# Altium schematic symbol library Centralize.SchLib: 1081 symbols (part 10 of 26)
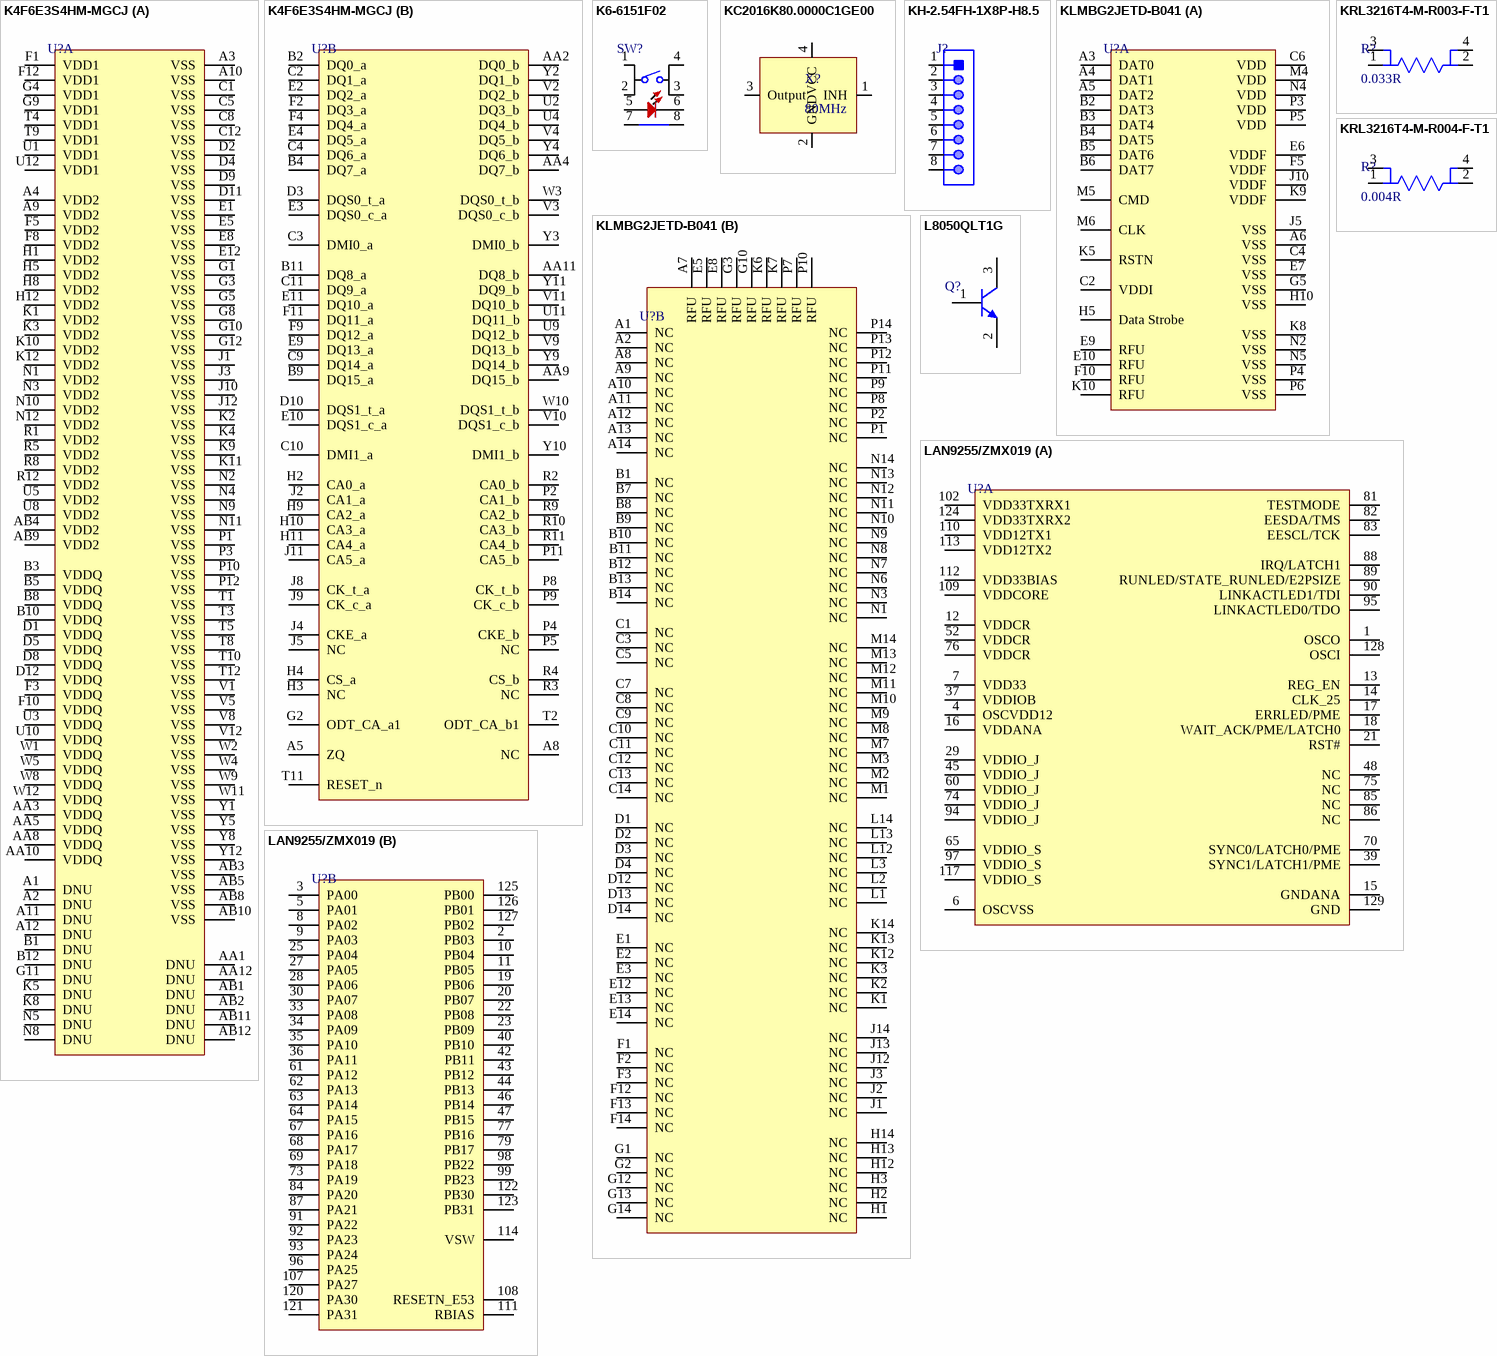
[diagram p56: symbols K4F6E3S4HM-MGCJ to LAN9255/ZMX019]

## KH-2.54FH-1X8P-H8.5
designator J?
2.54mm Plugin 3A -40℃~+105℃ Straight 1x8P 8.5mm Top 8 Square Holes Plugin,P=2.54mm Female Headers ROHS; Manufacturer: Shenzhen Kinghelm Elec; Manufacturer Part Number: KH-2.54FH-1X8P-H8.5; Item Type: Header; Package: Plugin,P=2.54mm; LCSC Part Number: C2905417; ComponentLink1Description: LCSC; ComponentLink1URL: https://www.lcsc.com/product-detail/span-style-background-color-ff0-Female-span-Headers_Shenzhen-Kinghelm-Elec-KH-2-54FH-1X8P-H8-5_C2905417.html
footprint HDR1X8 Female (Connector; Header; 8 Position)
pins: 1, 2, 3, 4, 5, 6, 7, 8

## KLMBG2JETD-B041
designator U?
FBGA-153 eMMC ROHS; Manufacturer: Samsung; Manufacturer Part Number: KLMBG2JETD-B041; Item Type: IC; Package: FBGA-153; LCSC Part Number: C2803245; ComponentLink1Description: LCSC; ComponentLink1URL: https://www.lcsc.com/product-detail/eMMC_Samsung-KLMBG2JETD-B041_C2803245.html
footprint BGA-153_
part A pins: A3 DAT0, A4 DAT1, A5 DAT2, A6 VSS, B2 DAT3, B3 DAT4, B4 DAT5, B5 DAT6, B6 DAT7, C2 VDDI, C4 VSS, C6 VDD, E6 VDDF, E7 VSS, E9 RFU, E10 RFU, F5 VDDF, F10 RFU, G5 VSS, H5 Data Strobe, H10 VSS, J5 VSS, J10 VDDF, K5 RSTN, K8 VSS, K9 VDDF, K10 RFU, M4 VDD, M5 CMD, M6 CLK, N2 VSS, N4 VDD, N5 VSS, P3 VDD, P4 VSS, P5 VDD, P6 VSS
part B pins: A1 NC, A2 NC, A7 RFU, A8 NC, A9 NC, A10 NC, A11 NC, A12 NC, A13 NC, A14 NC, B1 NC, B7 NC, B8 NC, B9 NC, B10 NC, B11 NC, B12 NC, B13 NC, B14 NC, C1 NC, C3 NC, C5 NC, C7 NC, C8 NC, C9 NC, C10 NC, C11 NC, C12 NC, C13 NC, C14 NC, D1 NC, D2 NC, D3 NC, D4 NC, D12 NC, D13 NC, D14 NC, E1 NC, E2 NC, E3 NC, E5 RFU, E8 RFU, E12 NC, E13 NC, E14 NC, F1 NC, F2 NC, F3 NC, F12 NC, F13 NC, F14 NC, G1 NC, G2 NC, G3 RFU, G10 RFU, G12 NC, G13 NC, G14 NC, H1 NC, H2 NC, H3 NC, H12 NC, H13 NC, H14 NC, J1 NC, J2 NC, J3 NC, J12 NC, J13 NC, J14 NC, K1 NC, K2 NC, K3 NC, K6 RFU, K7 RFU, K12 NC, K13 NC, K14 NC, L1 NC, L2 NC, L3 NC, L12 NC, L13 NC, L14 NC, M1 NC, M2 NC, M3 NC, M7 NC, M8 NC, M9 NC, M10 NC, M11 NC, M12 NC, M13 NC, M14 NC, N1 NC, N3 NC, N6 NC, N7 NC, N8 NC, N9 NC, N10 NC, N11 NC, N12 NC, N13 NC, N14 NC, P1 NC, P2 NC, P7 RFU, P8 NC, P9 NC, P10 RFU, P11 NC, P12 NC, P13 NC, P14 NC

## KRL3216T4-M-R003-F-T1
designator R?, comment 0.033R
RES 0.003 OHM 1W 1206 WIDE; Manufacturer: Susumu; Manufacturer Part Number: KRL3216T4-M-R003-F-T1; Resistance: 3mR; Tolerance: 1%; Temperature Coefficient: 100ppm/°C; Item Type: Resistor; Supplier 1: Mouser; RoHS: Yes; Category: Chip SMD Resistors; Stock 1: 654; Pricing 1: 1=1.70000, 10=1.70000, 50=1.70000, 100=0.84700, 1000=0.72000, 10000=0.72000 (USD); Case/Package: 1206; Case Code (Metric): 3216; Case Code (Imperial): 1206; Min Operating Temperature: -55°C; Max Operating Temperature: 155°C; Packaging: Tape and Reel; Resistor Type: Metal Foil; Number of Terminations: 4; Max Power Dissipation: 1W; Features: Automotive AEC-Q200; Length: 0.063inch; Width: 0.126inch; Height: 0.028inch; RoHS Compliant: Yes; ComponentLink1URL: https://datasheet.ciiva.com/29724/e-19-29724443.pdf?src-supplier=Digi-Key; ComponentLink1Description: https://datasheet.ciiva.com/29724/e-19-29724443.pdf?src-supplier=Digi-Key; Supplier Part Number 1: 754-KRL3216T4MR003FT; LCSC Part Number: C4119998
footprint Wide 1206
pins: 1, 2, 3, 4

## KRL3216T4-M-R004-F-T1
designator R?, comment 0.004R
RES 0.004 OHM 1W 1206 WIDE; Manufacturer: Susumu; Manufacturer Part Number: KRL3216T4-M-R004-F-T1; Resistance: 4mR; Tolerance: 1%; Temperature Coefficient: 50ppm/°C; Item Type: Resistor; Supplier 1: Newark; RoHS: Yes; Category: Chip SMD Resistors; Pricing 1: 1000=1.59000 (USD); Case/Package: 1206; Case Code (Metric): 3216; Case Code (Imperial): 1206; Min Operating Temperature: -55°C; Max Operating Temperature: 155°C; Packaging: Tape and Reel; Resistor Type: Metal Foil; Number of Terminations: 4; Max Power Dissipation: 1W; Features: Automotive AEC-Q200; Length: 0.063inch; Width: 0.126inch; Height: 0.028inch; RoHS Compliant: Yes; ComponentLink1URL: https://datasheet.ciiva.com/29724/e-19-29724444.pdf?src-supplier=Digi-Key; ComponentLink1Description: https://datasheet.ciiva.com/29724/e-19-29724444.pdf?src-supplier=Digi-Key; Supplier Part Number 1: 11AC4846; LCSC Part Number: C4031441
footprint Wide 1206
pins: 1, 2, 3, 4

## L8050QLT1G
designator Q?
25V 225mW 800mA NPN SOT-23 Bipolar Transistors - BJT ROHS; Manufacturer: LRC; Manufacturer Part Number: L8050QLT1G; Item Type: Mosfet; Package: SOT-23; LCSC Part Number: C49581; ComponentLink1Description: LCSC; ComponentLink1URL: https://www.lcsc.com/product-detail/Bipolar-Transistors-BJT_LRC-L8050QLT1G_C49581.html
footprint SOT-23 (TRANS NPN 40V 0.6A SOT23)
pins: 1 B, 2 E, 3 C

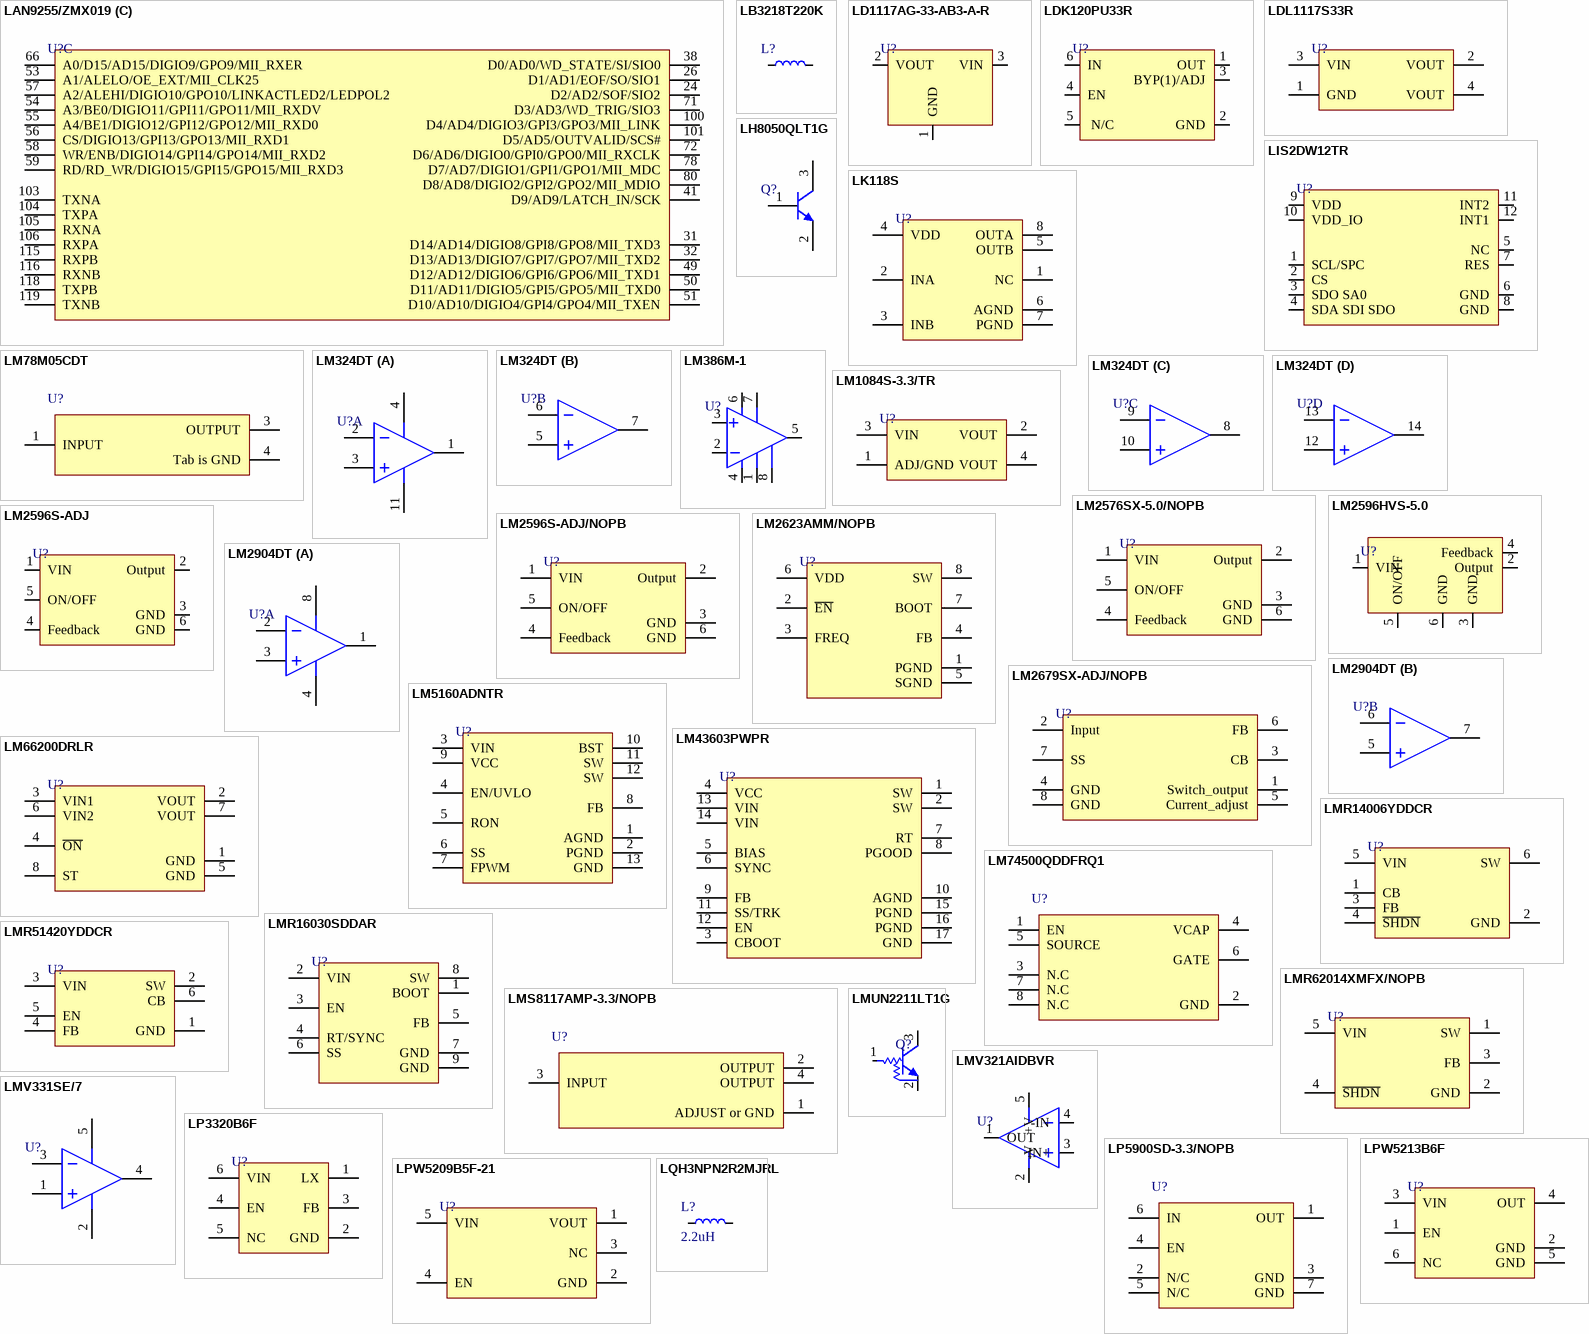
[diagram p13: symbols LAN9255/ZMX019 to LQH3NPN2R2MJRL]

## LAN9255/ZMX019
designator U?
IC ETHERCAT SLAVE CONTROLLER; Manufacturer: Microchip; Manufacturer Part Number: LAN9255-I/ZMX019; Supplier 1: Digi-Key; Stock 1: 70; Pricing 1: 1=17.76000, 25=16.18480 (USD); Supplier Part Number 1: 150-LAN9255-I/ZMX019-ND; Item Type: IC
footprint 128-TQFP (14x14)
part A pins: 1 OSCO, 4 OSCVDD12, 6 OSCVSS, 7 VDD33, 12 VDDCR, 13 REG_EN, 14 CLK_25, 15 GNDANA, 16 VDDANA, 17 ERRLED/PME, 18 WAIT_ACK/PME/LATCH0, 21 RST#, 29 VDDIO_J, 37 VDDIOB, 39 SYNC1/LATCH1/PME, 45 VDDIO_J, 48 NC, 52 VDDCR, 60 VDDIO_J, 65 VDDIO_S, 70 SYNC0/LATCH0/PME, 74 VDDIO_J, 75 NC, 76 VDDCR, 81 TESTMODE, 82 EESDA/TMS, 83 EESCL/TCK, 85 NC, 86 NC, 88 IRQ/LATCH1, 89 RUNLED/STATE_RUNLED/E2PSIZE, 90 LINKACTLED1/TDI, 94 VDDIO_J, 95 LINKACTLED0/TDO, 97 VDDIO_S, 102 VDD33TXRX1, 109 VDDCORE, 110 VDD12TX1, 112 VDD33BIAS, 113 VDD12TX2, 117 VDDIO_S, 124 VDD33TXRX2, 128 OSCI, 129 GND
part B pins: 2 PB03, 3 PA00, 5 PA01, 8 PA02, 9 PA03, 10 PB04, 11 PB05, 19 PB06, 20 PB07, 22 PB08, 23 PB09, 25 PA04, 27 PA05, 28 PA06, 30 PA07, 33 PA08, 34 PA09, 35 PA10, 36 PA11, 40 PB10, 42 PB11, 43 PB12, 44 PB13, 46 PB14, 47 PB15, 61 PA12, 62 PA13, 63 PA14, 64 PA15, 67 PA16, 68 PA17, 69 PA18, 73 PA19, 77 PB16, 79 PB17, 84 PA20, 87 PA21, 91 PA22, 92 PA23, 93 PA24, 96 PA25, 98 PB22, 99 PB23, 107 PA27, 108 RESETN_E53, 111 RBIAS, 114 VSW, 120 PA30, 121 PA31, 122 PB30, 123 PB31, 125 PB00, 126 PB01, 127 PB02
part C pins: 24 D2/AD2/SOF/SIO2, 26 D1/AD1/EOF/SO/SIO1, 31 D14/AD14/DIGIO8/GPI8/GPO8/MII_TXD3, 32 D13/AD13/DIGIO7/GPI7/GPO7/MII_TXD2, 38 D0/AD0/WD_STATE/SI/SIO0, 41 D9/AD9/LATCH_IN/SCK, 49 D12/AD12/DIGIO6/GPI6/GPO6/MII_TXD1, 50 D11/AD11/DIGIO5/GPI5/GPO5/MII_TXD0, 51 D10/AD10/DIGIO4/GPI4/GPO4/MII_TXEN, 53 A1/ALELO/OE_EXT/MII_CLK25, 54 A3/BE0/DIGIO11/GPI11/GPO11/MII_RXDV, 55 A4/BE1/DIGIO12/GPI12/GPO12/MII_RXD0, 56 CS/DIGIO13/GPI13/GPO13/MII_RXD1, 57 A2/ALEHI/DIGIO10/GPO10/LINKACTLED2/LEDPOL2, 58 WR/ENB/DIGIO14/GPI14/GPO14/MII_RXD2, 59 RD/RD_WR/DIGIO15/GPI15/GPO15/MII_RXD3, 66 A0/D15/AD15/DIGIO9/GPO9/MII_RXER, 71 D3/AD3/WD_TRIG/SIO3, 72 D6/AD6/DIGIO0/GPI0/GPO0/MII_RXCLK, 78 D7/AD7/DIGIO1/GPI1/GPO1/MII_MDC, 80 D8/AD8/DIGIO2/GPI2/GPO2/MII_MDIO, 100 D4/AD4/DIGIO3/GPI3/GPO3/MII_LINK, 101 D5/AD5/OUTVALID/SCS#, 103 TXNA, 104 TXPA, 105 RXNA, 106 RXPA, 115 RXPB, 116 RXNB, 118 TXPB, 119 TXNB

## LB3218T220K
designator L?
FIXED IND 22UH 255MA 490MOHM SMD; Manufacturer: Taiyo Yuden; Manufacturer Part Number: LB3218T220K; Core Material: Ferrite; Tolerance: 10%; Self Resonant Frequency: 19MHz; DC Resistance (DCR): 490mR; Test Frequency: 2.52MHz; Shielding: Unshielded; Item Type: Inductor; Supplier 1: Avnet; RoHS: Yes; Category: Fixed Inductors; Stock 1: 62; Pricing 1: 1=0.08700 (USD); Mounting Technology: Surface Mount; Case/Package: 1207; Pins: 2; Case Code (Metric): 3218; Case Code (Imperial): 1207; Min Operating Temperature: -40°C; Max Operating Temperature: 105°C; Packaging: Tape and Reel; Value: 22uH; Termination: SMD/SMT; Package Quantity: 2000; Current Rating: 255mA; Resistor Type: Wirewound; Max DC Current: 255mA; DC Current: 255mA; Series: LB; Length: 3.2mm; Width: 0.071inch; Height: 1.8mm; Height - Seated (Max): 0.08inch; Depth: 2mm; Radiation Hardening: No; RoHS Compliant: Yes; Military Standard: Not; Lead Free: Lead Free; Halogen Free: Halogen Free; ComponentLink1URL: https://datasheet.ciiva.com/1039/lb3218t220k-ss-1039280.pdf?src-supplier=Digi-Key; ComponentLink1Description: https://datasheet.ciiva.com/1039/lb3218t220k-ss-1039280.pdf?src-supplier=Digi-Key; ComponentLink2URL: https://datasheet.ciiva.com/8504/lb3218t220k-ss-8504739.pdf?src-supplier=Avnet; ComponentLink2Description: https://datasheet.ciiva.com/8504/lb3218t220k-ss-8504739.pdf?src-supplier=Avnet; ComponentLink3URL: https://datasheet.ciiva.com/26872/getdatasheetpartid-637493-26872233.pdf?src-supplier=Verical; ComponentLink3Description: https://datasheet.ciiva.com/26872/getdatasheetpartid-637493-26872233.pdf?src-supplier=Verical; ComponentLink4URL: https://datasheet.ciiva.com/15986/400lb3218t220k-15986619.pdf?src-supplier=Onlinecomponents.com; ComponentLink4Description: https://datasheet.ciiva.com/15986/400lb3218t220k-15986619.pdf?src-supplier=Onlinecomponents.com; ComponentLink5URL: https://datasheet.ciiva.com/25607/0900766b810b3abd-25607960.pdf?src-supplier=Rs; ComponentLink5Description: https://datasheet.ciiva.com/25607/0900766b810b3abd-25607960.pdf?src-supplier=Rs; Supplier Part Number 1: 24T3294; LCSC Part Number: C223400
footprint IND-3218
pins: 1, 2

## LD1117AG-33-AB3-A-R
designator U?
75dB@(120Hz) 1A Fixed 3.3V~3.3V Positive 15V SOT-89-3 Linear Voltage Regulators (LDO) ROHS; Manufacturer: UTC; Manufacturer Part Number: LD1117AG-33-AB3-A-R; Item Type: IC; Package: SOT-89-3; LCSC Part Number: C81768; ComponentLink1Description: LCSC; ComponentLink1URL: https://www.lcsc.com/product-detail/Linear-Voltage-Regulators-LDO_UTC-Unisonic-Tech-LD1117AG-33-AB3-A-R_C81768.html
footprint SOT-89-3
pins: 1 GND, 2 VOUT, 3 VIN

## LDK120PU33R
designator U?
IC REG LINEAR 3.3V 200MA 6DFN; Manufacturer: STMicroelectronics; Manufacturer Part Number: LDK120PU33R; Number of Outputs: 1; Min Input Voltage: 1.9V; Max Supply Voltage: 5.5V; Dropout Voltage: 150mV; Polarity: Positive; Quiescent Current: 60uA; Accuracy: 2%; Operating Supply Current: 50uA; Power Supply Rejection Ratio (PSRR): 55dB; Output Type: Fixed; Supplier 1: Mouser; RoHS: Yes; Category: Voltage Regulators - Linear; Stock 1: 1169; Pricing 1: 1=0.91, 10=0.752, 50=0.752, 100=0.614, 1000=0.388, 10000=0.343 (USD); Mounting Technology: Surface Mount; Case/Package: DFN; Pins: 6; Min Operating Temperature: -40°C; Max Operating Temperature: 125°C; Packaging: Tape and Reel; Max Output current: 200mA; Output Voltage: 3.3V; Output Current: 200mA; Number of Regulators: 1; Nominal Output Voltage: 3.3V; Package Quantity: 6000; Series: -; Length: 1.3mm; Width: 1.2mm; Height: 0.45mm; Radiation Hardening: No; Reach SVHC Compliant: No; Lead Free: Lead Free; RoHS Compliant: Yes; ComponentLink1URL: https://datasheet.ciiva.com/48475/dm00070790-48475005.pdf?src-supplier=Avnet; ComponentLink1Description: https://datasheet.ciiva.com/48475/dm00070790-48475005.pdf?src-supplier=Avnet; Supplier Part Number 1: 511-LDK120PU33R; LCSC Part Number: C2971162; Item Type: IC
footprint 6-DFN (1.2x1.3)
pins: 1 OUT, 2 GND, 3 BYP(1)/ADJ, 4 EN, 5  N/C, 6 IN

## LDL1117S33R
designator U?
IC REG LINEAR 3.3V 1.2A SOT223; Manufacturer: STMicroelectronics; Manufacturer Part Number: LDL1117S33R; Output Type: Fixed; Output Configuration: Positive; Number of Regulators: 1; Max Input Voltage: 18V; Dropout Voltage: 600mV; Quiescent Current: 500uA; Power Supply Rejection Ratio (PSRR): 65dB; Supplier 1: Digi-Key; Stock 1: 13064; Pricing 1: 1=0.45, 10=0.362, 100=0.2465, 500=0.1849, 1000=0.13867 (USD); Mount: Surface Mount; Case/Package: TO-261-4; Min Operating Temperature: -40°C; Max Operating Temperature: 125°C; Packaging: Tape and Reel; Min Output Voltage: 3.3V; Output Current: 1.2A; Supplier Part Number 1: 497-17239-6-ND; ComponentLink1Description: LCSC; ComponentLink1URL: https://www.lcsc.com/product-detail/Linear-Voltage-Regulators-LDO_STMicroelectronics-LDL1117S33R_C435835.html; LCSC Part Number: C435835; Item Type: IC
footprint SOT- 223
pins: 1 GND, 2 VOUT, 3 VIN, 4 VOUT

## LH8050QLT1G
designator Q?
100nA 50V 225mW 1.5A 500mV@800mA,80mA NPN -55℃~+150℃@(Tj) SOT-23(SOT-23-3) Bipolar Transistors - BJT ROHS; Manufacturer: LRC; Manufacturer Part Number: LH8050QLT1G; Package: SOT-23(SOT-23-3); ComponentLink1Description: LCSC; ComponentLink1URL: https://www.lcsc.com/product-detail/Bipolar-Transistors-BJT_LRC-LH8050QLT1G_C132810.html; LCSC Part Number: C132810
footprint SOT-23-3L_
pins: 1 B, 2 E, 3 C

## LIS2DW12TR
designator U?
ACCEL 2-16G I2C/SPI 12LGA; Manufacturer: STMicroelectronics; Manufacturer Part Number: LIS2DW12TR; Output Type: SPI,I2C; Axis: X, Y, Z; Bandwidth: 400Hz; Item Type: IC; Supplier: Mouser; Supplier Part Number: 511-LIS2DW12TR; RoHS: Yes; Category: Accelerometers; Stock: 14817; Pricing: 1=2.65, 10=2.16, 50=2.16, 100=1.54, 1000=1.21, 10000=0.988 (USD); Mounting Technology: Surface Mount; Case/Package: LGA; Pins: 12; Min Operating Temperature: -40°C; Max Operating Temperature: 85°C; Packaging: Cut Tape; Series: -; RoHS Compliant: Yes; ComponentLink1URL: http://www.farnell.com/datasheets/2581666.pdf?src-supplier=Farnell; ComponentLink1Description: http://www.farnell.com/datasheets/2581666.pdf?src-supplier=Farnell; LCSC Part Number: C189624
footprint 12-LGA (2x2)
pins: 1 SCL/SPC, 2 CS, 3 SDO SA0, 4 SDA SDI SDO, 5 NC, 6 GND, 7 RES, 8 GND, 9 VDD, 10 VDD_IO, 11 INT2, 12 INT1

## LK118S
designator U?
SOP-8 Motor Driver ICs ROHS; Manufacturer: LANKE; Manufacturer Part Number: LK118S; Item Type: IC; Package: SOP-8; LCSC Part Number: C2984834; ComponentLink1Description: LCSC; ComponentLink1URL: https://www.lcsc.com/product-detail/Motor-Driver-ICs_LANKE-LK118S_C2984834.html
footprint SOP-8
pins: 1 NC, 2 INA, 3 INB, 4 VDD, 5 OUTB, 6 AGND, 7 PGND, 8 OUTA

## LM78M05CDT
designator U?
IC REG LINEAR 5V 500MA TO252-3; Manufacturer: TI National Semiconductor; Manufacturer Part Number: LM78M05CDT; Min Input Voltage: 7.2V; Number of Outputs: 1; Max Input Voltage: 35V; Polarity: Positive; Quiescent Current: 10mA; Output Type: Fixed; Power Supply Rejection Ratio (PSRR): 78dB; Dropout Voltage: 1.8V; Supplier 1: Digi-Key; RoHS: No; Category: Voltage Regulators - Linear; Stock 1: 815; Pricing 1: 1=2.68000, 10=2.40700, 25=2.27120, 100=1.93490, 250=1.81684, 500=1.58974, 1000=1.49975 (USD); Mount: Surface Mount; Case/Package: TO-252; Number of Pins: 3; Min Operating Temperature: -40°C; Max Operating Temperature: 125°C; Output Voltage: 5V; Packaging: Rail/Tube; Output Current: 500mA; Number of Regulators: 1; Series: -; Package Quantity: 75; Max Output Current: 500mA; Current Rating: 500mA; Length: 6.58mm; Width: 6.1mm; Height: 2.3mm; Radiation Hardening: No; Lead Free: Contains Lead; RoHS Compliant: No; ComponentLink1URL: https://datasheet.ciiva.com/26906/lm78m05cdt-26906263.pdf?src-supplier=IIIC; ComponentLink1Description: https://datasheet.ciiva.com/26906/lm78m05cdt-26906263.pdf?src-supplier=IIIC; ComponentLink2URL: https://datasheet.ciiva.com/6584/lm341-6584030.pdf?src-supplier=Digi-Key; ComponentLink2Description: https://datasheet.ciiva.com/6584/lm341-6584030.pdf?src-supplier=Digi-Key; Supplier Part Number 1: LM78M05CDT-ND; LCSC Part Number: C3744128; Item Type: IC; ComponentLink3Description: LCSC; ComponentLink3URL: https://www.lcsc.com/product-detail/Linear-Voltage-Regulators-LDO_Texas-Instruments-LM78M05CDT_C3744128.html
footprint TO-252AA
pins: 1 INPUT, 3 OUTPUT, 4 Tab is GND

## LM324DT
designator U?
IC OPAMP GP 1.3MHZ 14SO; Manufacturer: STMicroelectronics; Manufacturer Part Number: LM324DT; Max Supply Voltage: 30V; Min Supply Voltage: 3V; Min Dual Supply Voltage: 1.5V; Max Dual Supply Voltage: 15V; Voltage Gain: 100dB; Slew Rate: 0.4V/µs; Common Mode Rejection Ratio: 70dB; Nominal Supply Current: 1.2mA; Input Offset Voltage (Vos): 7mV; Input Bias Current: 150nA; Number of Circuits: 4; Output Current per Channel: 40mA; Dual Supply Voltage: 12V; Supply Type: Single,Dual; Input Voltage Noise Density: 40nV/sqrt Hz; Max Power Dissipation: 400mW; Supplier 1: Arrow Electronics; RoHS: Yes; Category: Amplifiers - Op Amps, Buffer, Instrumentation; Stock 1: 287500; Pricing 1: 2500=0.18900 (USD); Mount: Surface Mount; Case/Package: SO; Number of Pins: 14; Contact Plating: Tin,Matte; Weight: 0.009143oz; Min Operating Temperature: 0°C; Max Operating Temperature: 70°C; Gain Bandwidth Product: 1.3MHz; Packaging: Cut Tape; Package Quantity: 2500; Operating Supply Current: 1.2mA; Operating Supply Voltage: 15V; Number of Channels: 4; Output Current: 40mA; Number of Elements: 4; Series: LM324; Technology: BIPOLAR; Bandwidth: 1.3MHz; Number of Amplifiers: 4; Unity Gain Bandwidth Product: 1.3MHz; Length: 8.75mm; Width: 4mm; Height: 1.65mm; Radiation Hardening: No; RoHS Compliant: Yes; Lead Free: Lead Free; REACH SVHC: No SVHC; ComponentLink1URL: https://datasheet.ciiva.com/4758/cd00000457-103203-4758032.pdf?src-supplier=Mouser; ComponentLink1Description: https://datasheet.ciiva.com/4758/cd00000457-103203-4758032.pdf?src-supplier=Mouser; ComponentLink2URL: https://datasheet.ciiva.com/8008/1834360-8008827.pdf?src-supplier=Element14; ComponentLink2Description: https://datasheet.ciiva.com/8008/1834360-8008827.pdf?src-supplier=Element14; ComponentLink3URL: https://datasheet.ciiva.com/8008/1834360-8008490.pdf?src-supplier=Element14; ComponentLink3Description: https://datasheet.ciiva.com/8008/1834360-8008490.pdf?src-supplier=Element14; ComponentLink4URL: https://datasheet.ciiva.com/28630/1834360-28630538.pdf?src-supplier=Element14; ComponentLink4Description: https://datasheet.ciiva.com/28630/1834360-28630538.pdf?src-supplier=Element14; ComponentLink5URL: https://datasheet.ciiva.com/1795/cd00000457-1795560.pdf?src-supplier=Digi-Key; ComponentLink5Description: https://datasheet.ciiva.com/1795/cd00000457-1795560.pdf?src-supplier=Digi-Key; ComponentLink6URL: https://datasheet.ciiva.com/1795/cd00000457-1795559.pdf?src-supplier=Digi-Key; ComponentLink6Description: https://datasheet.ciiva.com/1795/cd00000457-1795559.pdf?src-supplier=Digi-Key; ComponentLink7URL: https://datasheet.ciiva.com/1795/cd00000457-1795561.pdf?src-supplier=Digi-Key; ComponentLink7Description: https://datasheet.ciiva.com/1795/cd00000457-1795561.pdf?src-supplier=Digi-Key; ComponentLink8URL: https://datasheet.ciiva.com/16375/cd00000457-16375528.pdf?src-supplier=Future+Electronics; ComponentLink8Description: https://datasheet.ciiva.com/16375/cd00000457-16375528.pdf?src-supplier=Future+Electronics; Supplier Part Number 1: LM324DT
footprint SO-14 (0.4 V/us 4 1.3MHz 3V ~ 32V, ±1.5V ~ 16V 1.5mA General Purpose SOIC-14_150mil Operational Amplifier ROHS)
part A pins: 1 1OUT, 2 IN-, 3 IN+, 4 VCC+ (power), 11 VCC- (power)
part B pins: 5 2IN+, 6 2IN-, 7 2OUT
part C pins: 8 3OUT, 9 3IN-, 10 3IN+
part D pins: 12 4IN+, 13 4IN-, 14 4OUT

## LM386M-1
designator U?
SOP-8 Audio Power OpAmps ROHS; Manufacturer: Slkor; Manufacturer Part Number: LM386M-1; Item Type: IC; Package: SOP-8; LCSC Part Number: C5375298; ComponentLink1Description: LCSC; ComponentLink1URL: https://www.lcsc.com/product-detail/Audio-Power-OpAmps_Slkor-SLKORMICRO-Elec-LM386M-1_C5375298.html
footprint SOP-8
pins: 1 GAIN, 2 INPUT -, 3 INPUT +, 4 GND, 5 VOUT, 6 VCC, 7 BYPASS, 8 GAIN

## LM1084S-3.3/TR
designator U?
72dB@(120Hz) 5A Fixed 3.3V~3.3V Positive 12V TO-263-3 Linear Voltage Regulators (LDO) ROHS; Manufacturer: HGSEMI; Manufacturer Part Number: LM1084S-3.3/TR; Item Type: IC; Package: TO-263-3; LCSC Part Number: C259972; ComponentLink1Description: LCSC; ComponentLink1URL: https://www.lcsc.com/product-detail/Linear-Voltage-Regulators-LDO_HGSEMI-LM1084S-3-3-TR_C259972.html
footprint TO263-3_
pins: 1 ADJ/GND, 2 VOUT, 3 VIN, 4 VOUT

## LM2576SX-5.0/NOPB
designator U?
IC REG BUCK 5V 3A TO263-5; Manufacturer: TI National Semiconductor; Manufacturer Part Number: LM2576SX-5.0/NOPB; Switching Frequency: 52kHz; Quiescent Current: 5mA; Number of Outputs: 1; Efficiency: 77%; Min Input Voltage: 4V; Max Supply Voltage: 40V; Synchronous Rectifier: No; Output Type: Fixed; Supplier 1: Mouser; RoHS: Yes; Category: Voltage Regulators - Switching; Stock 1: 734; Pricing 1: 1=4.06000, 10=3.64000, 50=3.44000, 100=2.98000, 1000=2.54000, 10000=2.54000 (USD); Mounting Technology: Surface Mount; Case/Package: TO-263-6; Pins: 5; Min Operating Temperature: -40°C; Max Operating Temperature: 125°C; Packaging: Tape and Reel; Output Voltage: 5V; Output Current: 3A; Series: SIMPLE SWITCHER®; Nominal Output Voltage: 5V; Reach SVHC Compliant: No; Lead Free: Contains Lead; RoHS Compliant: Yes; ComponentLink1URL: https://datasheet.ciiva.com/41457/001013741-da-01-en-ic-reg-bu-lm2576sx-5-0-nopb-to-263-5-tid-41457614.pdf?src-supplier=Conrad; ComponentLink1Description: https://datasheet.ciiva.com/41457/001013741-da-01-en-ic-reg-bu-lm2576sx-5-0-nopb-to-263-5-tid-41457614.pdf?src-supplier=Conrad; Supplier Part Number 1: 926-LM2576SX-5.0NOPB; LCSC Part Number: C34465; Item Type: IC
footprint TO-263-5 (D2PAK)
pins: 1 VIN, 2 Output, 3 GND, 4 Feedback, 5 ON/OFF, 6 GND

## LM2596HVS-5.0
designator U?
Step-down type Fixed 5V 3A 57V TO-263-5 DC-DC Converters ROHS; Manufacturer: UMW; Manufacturer Part Number: LM2596HVS-5.0; Item Type: IC; Package: TO-263-5; LCSC Part Number: C347445; ComponentLink1Description: LCSC; ComponentLink1URL: https://www.lcsc.com/product-detail/DC-DC-Converters_UMW-Youtai-Semiconductor-Co-Ltd-LM2596HVS-5-0_C347445.html
footprint TO-263-5 (D2PAK)
pins: 1 VIN, 2 Output, 3 GND, 4 Feedback, 5 ON/OFF, 6 GND

## LM2596S-ADJ
designator U?
Step-down type Adjustable 40V~40V 1.2V~37V 3A TO-263-5 DC-DC Converters ROHS; Manufacturer: UMW; Manufacturer Part Number: LM2596S-ADJ; Item Type: IC; Package: TO-263-5; LCSC Part Number: C347423; ComponentLink1Description: LCSC; ComponentLink1URL: https://www.lcsc.com/product-detail/DC-DC-Converters_UMW-Youtai-Semiconductor-Co-Ltd-LM2596S-ADJ_C347423.html
footprint TO-263-5 (D2PAK)
pins: 1 VIN, 2 Output, 3 GND, 4 Feedback, 5 ON/OFF, 6 GND

## LM2596S-ADJ/NOPB
designator U?
IC REG BUCK ADJ 3A TO263-5; Manufacturer: TI National Semiconductor; Manufacturer Part Number: LM2596S-ADJ/NOPB; Number of Outputs: 1; Output Voltage: 37V; Min Input Voltage: 4.5V; Max Input Voltage: 40V; Switching Frequency: 173kHz; Efficiency: 73%; Min Output Voltage: 1.2V; Quiescent Current: 5mA; Output Type: Adjustable; Supplier 1: Mouser; RoHS: Yes; Category: Voltage Regulators - Switching; Pricing 1: 1=7.15000, 10=6.46000, 50=6.16000, 100=5.34000, 1000=5.10000, 10000=5.10000 (USD); Mount: Surface Mount; Case/Package: TO-263; Number of Pins: 5; Weight: 0.056128oz; Contact Plating: Tin,Matte; Min Operating Temperature: -40°C; Max Operating Temperature: 125°C; Max Output Current: 3A; Packaging: Rail/Tube; Output Current: 3A; Operating Supply Voltage: 40V; Series: LM2596; Max Output Voltage: 37V; Length: 10.16mm; Width: 8.64mm; Height: 4.57mm; Radiation Hardening: No; Lead Free: Contains Lead; Reach SVHC Compliant: Yes; RoHS Compliant: Yes; ComponentLink1URL: https://datasheet.ciiva.com/27056/2051160-27056491.pdf?src-supplier=Jameco; ComponentLink1Description: https://datasheet.ciiva.com/27056/2051160-27056491.pdf?src-supplier=Jameco; ComponentLink2URL: https://datasheet.ciiva.com/15112/getdatasheetpartid-55559-15112636.pdf?src-supplier=Verical; ComponentLink2Description: https://datasheet.ciiva.com/15112/getdatasheetpartid-55559-15112636.pdf?src-supplier=Verical; ComponentLink3URL: https://datasheet.ciiva.com/41457/001013814-da-01-en-ic-reg-buc-lm2596s-adj-nopb-to-263-5-tid-41457756.pdf?src-supplier=Conrad; ComponentLink3Description: https://datasheet.ciiva.com/41457/001013814-da-01-en-ic-reg-buc-lm2596s-adj-nopb-to-263-5-tid-41457756.pdf?src-supplier=Conrad; ComponentLink4URL: https://datasheet.ciiva.com/22669/1874590-22669464.pdf?src-supplier=Element14; ComponentLink4Description: https://datasheet.ciiva.com/22669/1874590-22669464.pdf?src-supplier=Element14; ComponentLink5URL: https://datasheet.ciiva.com/14150/jqlm2596x-xx-e-14150653.pdf?src-supplier=Distrelec; ComponentLink5Description: https://datasheet.ciiva.com/14150/jqlm2596x-xx-e-14150653.pdf?src-supplier=Distrelec; ComponentLink6URL: https://datasheet.ciiva.com/6596/lm2596-6596342.pdf?src-supplier=Digi-Key; ComponentLink6Description: https://datasheet.ciiva.com/6596/lm2596-6596342.pdf?src-supplier=Digi-Key; Supplier Part Number 1: 926-LM2596S-ADJ/NOPB; LCSC Part Number: C1355333; Item Type: IC
footprint DDPAK
pins: 1 VIN, 2 Output, 3 GND, 4 Feedback, 5 ON/OFF, 6 GND

## LM2623AMM/NOPB
designator U?
IC REG BOOST ADJ 2.2A 8VSSOP; Manufacturer: TI National Semiconductor; Manufacturer Part Number: LM2623AMM/NOPB; Output Voltage: 14V; Output Current: 2A; Switching Frequency: 2MHz; Min Supply Voltage: 800mV; Efficiency: 87%; Number of Outputs: 1; Min Output Voltage: 1.24V; Quiescent Current: 80uA; Output Type: Adjustable; Output Configuration: Positive; Synchronous Rectifier: No; Nominal Supply Current: 16mA; Output Power: 500mW; Supplier 1: Mouser; RoHS: Yes; Category: Voltage Regulators - Switching; Stock 1: 1022; Pricing 1: 1=1.99000, 10=1.79000, 50=1.69000, 100=1.44000, 1000=0.98000, 10000=0.89300 (USD); Mounting Technology: Surface Mount; Case/Package: MSOP; Pins: 8; Weight: 0.004938oz; Min Operating Temperature: -40°C; Max Operating Temperature: 85°C; Package Quantity: 1000; Min Input Voltage: 800mV; Packaging: Tape and Reel; Max Output current: 2A; Max Supply Voltage: 14V; Max Output Voltage: 14V; Topology: Boost; Series: -; Length: 3mm; Width: 3.1mm; Height: 0.86mm; Radiation Hardening: No; Reach SVHC Compliant: Yes; Lead Free: Lead Free; Supplier Part Number 1: 926-LM2623AMM/NOPB; LCSC Part Number: C330402; Item Type: IC
footprint VSSOP-8-0.65mm
pins: 1 PGND, 2 ~{EN}, 3 FREQ, 4 FB, 5 SGND, 6 VDD, 7 BOOT, 8 SW

## LM2679SX-ADJ/NOPB
designator U?
IC REG BUCK ADJ 5A TO263-7; Manufacturer: TI National Semiconductor; Manufacturer Part Number: LM2679SX-ADJ/NOPB; Min Input Voltage: 8V; Number of Outputs: 1; Output Voltage: 37V; Efficiency: 84%; Max Supply Voltage: 40V; Switching Frequency: 260kHz; Quiescent Current: 4.2mA; Output Type: Adjustable; Synchronous Rectifier: No; Supplier 1: Mouser; RoHS: Yes; Category: Voltage Regulators - Switching; Stock 1: 3995; Pricing 1: 1=6.97, 10=6.26, 50=5.92, 100=5.13, 1000=3.72, 10000=3.72 (USD); Mounting Technology: Surface Mount; Case/Package: TO-263; Min Operating Temperature: -40°C; Max Operating Temperature: 125°C; Packaging: Tape and Reel; Output Current: 5A; Series: SIMPLE SWITCHER®; Package Quantity: 500; Min Supply Voltage: 8V; Lead Free: Contains Lead; RoHS Compliant: Yes; ComponentLink1URL: https://datasheet.ciiva.com/6596/lm2679-6596695.pdf?src-supplier=Digi-Key; ComponentLink1Description: https://datasheet.ciiva.com/6596/lm2679-6596695.pdf?src-supplier=Digi-Key; ComponentLink2URL: https://datasheet.ciiva.com/6596/lm2679-6596699.pdf?src-supplier=Digi-Key; ComponentLink2Description: https://datasheet.ciiva.com/6596/lm2679-6596699.pdf?src-supplier=Digi-Key; ComponentLink3URL: https://datasheet.ciiva.com/6596/lm2679-6596693.pdf?src-supplier=Digi-Key; ComponentLink3Description: https://datasheet.ciiva.com/6596/lm2679-6596693.pdf?src-supplier=Digi-Key; ComponentLink4URL: https://datasheet.ciiva.com/41457/001013915-da-01-en-ic-reg-bu-lm2679sx-adj-nopb-to-263-7-tid-41457948.pdf?src-supplier=Conrad; ComponentLink4Description: https://datasheet.ciiva.com/41457/001013915-da-01-en-ic-reg-bu-lm2679sx-adj-nopb-to-263-7-tid-41457948.pdf?src-supplier=Conrad; Supplier Part Number 1: 926-LM2679SXADJNOPB; LCSC Part Number: C2877272; Item Type: IC
footprint TO-263-7
pins: 1 Switch_output, 2 Input, 3 CB, 4 GND, 5 Current_adjust, 6 FB, 7 SS, 8 GND

## LM2904DT
designator U?
General Purpose Amplifier 2 Circuit  8-SO; Manufacturer: STMicroelectronics; Manufacturer Part Number: LM2904DT; Number of Terminals/Pins: 8; Package Body Material: Plastic; Number of Channels: 2; Bandwidth: 1.1MHz; Max Supply Voltage: 30V; Min Supply Voltage: 3V; Min Dual Supply Voltage: 1.5V; Max Dual Supply Voltage: 15V; Voltage Gain: 100dB; Output Current: 40mA; Slew Rate: 0.6V/µs; Nominal Supply Current: 1.2mA; Common Mode Rejection Ratio: 70dB; Input Offset Voltage (Vos): 7mV; Input Bias Current: 150nA; Operating Supply Current: 700uA; Dual Supply Voltage: 9V; Max Supply Current: 32mA; Time @ Peak Reflow Temperature-Max (s): 40s; Item Type: IC; Supplier 1: Mouser; RoHS: Yes; Category: Amplifiers - Op Amps, Buffer, Instrumentation; Stock 1: 104539; Pricing 1: 1=0.44000, 10=0.34900, 50=0.34900, 100=0.25900, 1000=0.17000, 10000=0.15000 (USD); Mount: Surface Mount; Case/Package: SOIC; Number of Pins: 8; Contact Plating: Gold; Weight: 0.01lb; Package Shape: Rectangular; Terminal Finish: Nickel; Min Operating Temperature: -40°C; Max Operating Temperature: 125°C; Packaging: Tape and Reel; Gain Bandwidth Product: 1.1MHz; Number of Circuits: 2; Package Quantity: 2500; Operating Supply Voltage: 15V; Supply Current: 1.2mA; Technology: BIPOLAR; Series: -; Output Current per Channel: 40mA; Number of Elements: 2; Number of Amplifiers: 2; Amplifier Type: GENERAL PURPOSE; Unity Gain Bandwidth Product: 1.1MHz; Number of Functions: 2; Terminal Form: Gull Wing; Terminal Position: DUAL; Moisture Sensitivity Level: 1; JESD-30 Code: R-PDSO-G8; Surface Mount: Yes; Peak Reflow Temperature (Cel): 260°C; Input Offset Voltage-Max: 7mV; Slew Rate-Nom: 0.6V/µs; Length: 4.9mm; Width: 3.9mm; Height: 1.25mm; Radiation Hardening: No; Reach SVHC Compliant: Yes; Lead Free: Contains Lead; RoHS Compliant: Yes; Temperature Grade: AUTOMOTIVE; ComponentLink1URL: https://datasheet.ciiva.com/5703/1802155-5703335.pdf?src-supplier=Farnell; ComponentLink1Description: https://datasheet.ciiva.com/5703/1802155-5703335.pdf?src-supplier=Farnell; ComponentLink2URL: https://datasheet.ciiva.com/27055/1993227-27055857.pdf?src-supplier=Jameco; ComponentLink2Description: https://datasheet.ciiva.com/27055/1993227-27055857.pdf?src-supplier=Jameco; ComponentLink3URL: https://datasheet.ciiva.com/15129/getdatasheetpartid-32489-15129656.pdf?src-supplier=Verical; ComponentLink3Description: https://datasheet.ciiva.com/15129/getdatasheetpartid-32489-15129656.pdf?src-supplier=Verical; ComponentLink4URL: https://datasheet.ciiva.com/41459/001185000-da-01-en-ic-op-amp-low-pwr-du-lm2904dt-soic-8-stm-41459659.pdf?src-supplier=Conrad; ComponentLink4Description: https://datasheet.ciiva.com/41459/001185000-da-01-en-ic-op-amp-low-pwr-du-lm2904dt-soic-8-stm-41459659.pdf?src-supplier=Conrad; ComponentLink5URL: https://datasheet.ciiva.com/1795/cd00000535-1795476.pdf?src-supplier=Digi-Key; ComponentLink5Description: https://datasheet.ciiva.com/1795/cd00000535-1795476.pdf?src-supplier=Digi-Key; ComponentLink6URL: https://datasheet.ciiva.com/1795/cd00000535-1795475.pdf?src-supplier=Digi-Key; ComponentLink6Description: https://datasheet.ciiva.com/1795/cd00000535-1795475.pdf?src-supplier=Digi-Key; ComponentLink7URL: https://datasheet.ciiva.com/1795/cd00000535-1795477.pdf?src-supplier=Digi-Key; ComponentLink7Description: https://datasheet.ciiva.com/1795/cd00000535-1795477.pdf?src-supplier=Digi-Key; ComponentLink8URL: https://datasheet.ciiva.com/16200/cd00000535-16200605.pdf?src-supplier=Future+Electronics; ComponentLink8Description: https://datasheet.ciiva.com/16200/cd00000535-16200605.pdf?src-supplier=Future+Electronics; Supplier Part Number 1: 511-LM2904DT; LCSC Part Number: C105411
footprint SOIC-8
part A pins: 1 1OUT, 2 IN-, 3 IN+, 4 VCC- (power), 8 VCC+ (power)
part B pins: 5 2IN+, 6 2IN-, 7 2OUT

## LM5160ADNTR
designator U?
IC REG BUCK FLYBCK ADJ 12WSON; Manufacturer: Texas Instruments; Manufacturer Part Number: LM5160ADNTR; Number of Outputs: 1; Min Input Voltage: 4.5V; Max Input Voltage: 65V; Min Output Voltage: 2V; Max Output Voltage: 60V; Output Current: 1.5A; Switching Frequency: 1MHz; Synchronous Rectifier: Yes; Quiescent Current: 2.3mA; Topology: Flyback; Output Type: Adjustable; Supplier 1: Digi-Key; RoHS: Yes; Category: Power Supply Modules; Pricing 1: 1=5.87000, 10=5.27300, 25=4.98480, 100=4.32000, 250=4.09848, 500=3.67756 (USD); Mount: Surface Mount; Min Operating Temperature: -40°C; Max Operating Temperature: 125°C; Packaging: Tape and Reel; Lead Free: Lead Free; RoHS Compliant: Yes; ComponentLink1URL: http://www.ti.com/lit/ds/symlink/lm5160a.pdf?src-supplier=Digi-Key; ComponentLink1Description: http://www.ti.com/lit/ds/symlink/lm5160a.pdf?src-supplier=Digi-Key; ComponentLink2URL: http://www.ti.com/general/docs/suppproductinfo.tsp?distId=10&amp;gotoUrl=http%3A%2F%2Fwww.ti.com%2Flit%2Fgpn%2Flm5160a&src-supplier=Digi-Key; ComponentLink2Description: http://www.ti.com/general/docs/suppproductinfo.tsp?distId=10&amp;gotoUrl=http%3A%2F%2Fwww.ti.com%2Flit%2Fgpn%2Flm5160a&src-supplier=Digi-Key; Supplier Part Number 1: 296-46121-6-ND; LCSC Part Number: C473375; Item Type: IC
footprint 12-WSON (4x4)
pins: 1 AGND, 2 PGND, 3 VIN, 4 EN/UVLO, 5 RON, 6 SS, 7 FPWM, 8 FB, 9 VCC, 10 BST, 11 SW, 12 SW, 13 GND

## LM43603PWPR
designator U?
3.5V to 36V, 3A Synchronous Step-Down Voltage Converter 16-HTSSOP -40 to 125; Manufacturer: Texas Instruments; Manufacturer Part Number: LM43603PWPR; Number of Outputs: 1; Output Voltage: 28V; Switching Frequency: 2.2MHz; Quiescent Current: 27uA; Supplier 1: Digi-Key; RoHS: Yes; Category: Power Supply Modules; Pricing 1: 1=5.03000, 10=4.51800, 25=4.27160, 100=3.70200, 250=3.51216, 500=3.15144, 1000=3.13425 (USD); Mount: Surface Mount; Case/Package: SOP; Number of Pins: 16; Weight: 0.225753oz; Min Operating Temperature: -40°C; Max Operating Temperature: 125°C; Packaging: Tape and Reel; Max Output Current: 3A; Min Input Voltage: 3.5V; Max Input Voltage: 36V; Package Quantity: 2000; Operating Supply Voltage: 36V; Radiation Hardening: No; Lead Free: Lead Free; RoHS Compliant: Yes; ComponentLink1URL: http://www.ti.com/general/docs/lit/getliterature.tsp?genericPartNumber=LM43603&&fileType=pdf&src-supplier=Avnet; ComponentLink1Description: http://www.ti.com/general/docs/lit/getliterature.tsp?genericPartNumber=LM43603&&fileType=pdf&src-supplier=Avnet; ComponentLink2URL: http://www.ti.com/general/docs/suppproductinfo.tsp?distId=10&amp;gotoUrl=http%3A%2F%2Fwww.ti.com%2Flit%2Fgpn%2Flm43603&src-supplier=Digi-Key; ComponentLink2Description: http://www.ti.com/general/docs/suppproductinfo.tsp?distId=10&amp;gotoUrl=http%3A%2F%2Fwww.ti.com%2Flit%2Fgpn%2Flm43603&src-supplier=Digi-Key; ComponentLink3URL: http://www.ti.com/lit/ds/symlink/lm43603.pdf?src-supplier=Digi-Key; ComponentLink3Description: http://www.ti.com/lit/ds/symlink/lm43603.pdf?src-supplier=Digi-Key; ComponentLink4URL: http://www.ti.com/lit/gpn/lm43603?src-supplier=Mouser; ComponentLink4Description: http://www.ti.com/lit/gpn/lm43603?src-supplier=Mouser; Supplier Part Number 1: 296-44477-1-ND; LCSC Part Number: C412826
footprint HTSSOP-16
pins: 1 SW, 2 SW, 3 CBOOT, 4 VCC, 5 BIAS, 6 SYNC, 7 RT, 8 PGOOD, 9 FB, 10 AGND, 11 SS/TRK, 12 EN, 13 VIN, 14 VIN, 15 PGND, 16 PGND, 17 GND

## LM66200DRLR
designator U?
OR Controller N+1 ORing Controller N-Channel 2:1 SOT-583; Manufacturer: Texas Instruments; Manufacturer Part Number: LM66200DRLR; Item Type: IC; Supplier 1: Mouser; RoHS: No; Category: Integrated Circuits (ICs); Stock 1: 11717; Pricing 1: 1=0.80000, 10=0.70000, 50=0.65800, 100=0.53700, 1000=0.34000, 10000=0.30700 (USD); Supplier Part Number 1: 595-LM66200DRLR; LCSC Part Number: C3235556
footprint SOT-583
pins: 1 GND, 2 VOUT, 3 VIN1 , 4 ~{ON} , 5 GND, 6 VIN2, 7 VOUT, 8 ST

## LM74500QDDFRQ1
designator U?
Battery Battery Protection IC TSOT-23-8; Manufacturer: Texas Instruments; Manufacturer Part Number: LM74500QDDFRQ1; Supplier 1: Digi-Key; RoHS: No; Category: Battery Management; Stock 1: 1956; Pricing 1: 1=1.78000, 10=1.59800, 25=1.50800, 100=1.28470, 250=1.20628, 500=1.05550, 1000=0.87455 (USD); ComponentLink1Description: Digikey; ComponentLink1URL: https://www.digikey.com/en/products/detail/texas-instruments/LM74500QDDFRQ1/13896418; Item Type: IC
footprint TSOT-23-8_
pins: 1 EN, 2 GND, 3 N.C, 4 VCAP, 5 SOURCE, 6 GATE, 7 N.C, 8 N.C

## LMR14006YDDCR
designator U?
IC REG BUCK ADJ 600MA TSOT23-6; Manufacturer: Texas Instruments; Manufacturer Part Number: LMR14006YDDCR; Number of Outputs: 1; Min Input Voltage: 4V; Max Input Voltage: 40V; Switching Frequency: 2.415MHz; Quiescent Current: 28uA; Output Type: Fixed,Adjustable; Supplier 1: Mouser; RoHS: Yes; Category: Voltage Regulators - Switching; Pricing 1: 1=2.41000, 10=2.18000, 50=2.06000, 100=1.75000, 1000=1.20000, 10000=1.19000 (USD); Mount: Surface Mount; Case/Package: SOT-23-6; Number of Pins: 6; Weight: 0.00127oz; Min Operating Temperature: -40°C; Max Operating Temperature: 125°C; Packaging: Tape and Reel; Max Output Current: 600mA; Output Current: 600mA; Package Quantity: 3000; Operating Supply Voltage: 40V; Radiation Hardening: No; Lead Free: Lead Free; RoHS Compliant: Yes; ComponentLink1URL: https://datasheet.ciiva.com/29899/lmr14006-29899414.pdf?src-supplier=Avnet; ComponentLink1Description: https://datasheet.ciiva.com/29899/lmr14006-29899414.pdf?src-supplier=Avnet; LCSC Part Number: C477919; Item Type: IC; Supplier Part Number 1: 595-LMR14006YDDCR
footprint TSOP-6L
pins: 1 CB, 2 GND, 3 FB, 4 ~{SHDN}, 5 VIN, 6 SW

## LMR16030SDDAR
designator U?
IC REG BUCK ADJUSTABLE 3A 8SOPWR; Manufacturer: Texas Instruments; Manufacturer Part Number: LMR16030SDDAR; Quiescent Current: 40uA; Supplier 1: Digi-Key; RoHS: Yes; Category: Voltage Regulators - Switching; Stock 1: 10434; Pricing 1: 1=4.08000, 10=3.66300, 25=3.46320, 100=3.00130, 250=2.84736, 500=2.55494, 1000=2.17800 (USD); Number of Pins: 8; Min Operating Temperature: -40°C; Max Operating Temperature: 125°C; Lead Free: Lead Free; RoHS Compliant: Yes; ComponentLink1URL: http://www.ti.com/lit/ds/symlink/lmr16030.pdf?src-supplier=Digi-Key; ComponentLink1Description: http://www.ti.com/lit/ds/symlink/lmr16030.pdf?src-supplier=Digi-Key; ComponentLink2URL: http://www.ti.com/general/docs/suppproductinfo.tsp?distId=10&amp;gotoUrl=http%3A%2F%2Fwww.ti.com%2Flit%2Fgpn%2Flmr16030&src-supplier=Digi-Key; ComponentLink2Description: http://www.ti.com/general/docs/suppproductinfo.tsp?distId=10&amp;gotoUrl=http%3A%2F%2Fwww.ti.com%2Flit%2Fgpn%2Flmr16030&src-supplier=Digi-Key; Supplier Part Number 1: 296-47797-1-ND; LCSC Part Number: C136648; Item Type: IC
footprint 8-SO-EP_
pins: 1 BOOT, 2 VIN, 3 EN, 4 RT/SYNC, 5 FB, 6 SS, 7 GND, 8 SW, 9 GND

## LMR51420YDDCR
designator U?
IC REG BUCK ADJ 2A SOT23-THIN; Manufacturer: Texas Instruments; Manufacturer Part Number: LMR51420YDDCR; Supplier 1: Mouser; RoHS: No; Category: Integrated Circuits (ICs); Stock 1: 6752; Pricing 1: 1=1.56, 10=1.41, 50=1.33, 100=1.13, 1000=0.77, 10000=0.769 (USD); LCSC Part Number: C5383002; Item Type: IC; Supplier Part Number 1: 595-LMR51420YDDCR; ComponentLink1Description: LCSC; ComponentLink1URL: https://www.lcsc.com/product-detail/DC-DC-Converters_Texas-Instruments-LMR51420YDDCR_C5383002.html
footprint SOT-23-6 THIN
pins: 1 GND, 2 SW, 3 VIN, 4 FB, 5 EN, 6 CB

## LMR62014XMFX/NOPB
designator U?
IC REG BOOST ADJ 1.8A SOT23-5; Manufacturer: TI National Semiconductor; Manufacturer Part Number: LMR62014XMFX/NOPB; Output Voltage: 20V; Min Input Voltage: 2.7V; Number of Outputs: 1; Max Output current: 1.4A; Max Supply Voltage: 14V; Min Output Voltage: 3V; Switching Frequency: 1.6MHz; Synchronous Rectifier: No; Quiescent Current: 2mA; Output Type: Adjustable; Output Configuration: Positive; Supplier 1: Mouser; RoHS: Yes; Category: Voltage Regulators - Switching; Stock 1: 7014; Pricing 1: 1=0.96000, 10=0.86100, 50=0.81700, 100=0.67100, 1000=0.43800, 10000=0.39800 (USD); Mounting Technology: Surface Mount; Case/Package: SOT-23-5; Pins: 5; Contact Plating: Tin,Matte; Min Operating Temperature: -40°C; Max Operating Temperature: 125°C; Output Current: 1.8A; Packaging: Tape and Reel; Package Quantity: 3000; Max Output Voltage: 20V; Topology: Boost; Series: SIMPLE SWITCHER®; Radiation Hardening: No; Lead Free: Lead Free; RoHS Compliant: Yes; ComponentLink1URL: http://www.ti.com/lit/ds/symlink/lmr62014.pdf?src-supplier=Farnell; ComponentLink1Description: http://www.ti.com/lit/ds/symlink/lmr62014.pdf?src-supplier=Farnell; ComponentLink2URL: http://www.ti.com/lit/ds/symlink/lmr62014.pdf?src-supplier=Digi-Key; ComponentLink2Description: http://www.ti.com/lit/ds/symlink/lmr62014.pdf?src-supplier=Digi-Key; ComponentLink3URL: http://www.ti.com/lit/gpn/lmr62014?src-supplier=Mouser; ComponentLink3Description: http://www.ti.com/lit/gpn/lmr62014?src-supplier=Mouser; ComponentLink4URL: http://www.ti.com/general/docs/lit/getliterature.tsp?genericPartNumber=LMR62014&&fileType=pdf&src-supplier=Avnet; ComponentLink4Description: http://www.ti.com/general/docs/lit/getliterature.tsp?genericPartNumber=LMR62014&&fileType=pdf&src-supplier=Avnet; ComponentLink5URL: http://components.arrow.com/part/dataview/56704644S382285N1317?src-supplier=Arrow+Electronics; ComponentLink5Description: http://components.arrow.com/part/dataview/56704644S382285N1317?src-supplier=Arrow+Electronics; Supplier Part Number 1: 926-LMR62014XMFXNOPB; LCSC Part Number: C468235; Item Type: IC
footprint SOT-23-5
pins: 1 SW, 2 GND, 3 FB, 4 ~{SHDN} , 5 VIN

## LMS8117AMP-3.3/NOPB
designator U?
IC REG LINEAR 3.3V 1A SOT223; Manufacturer: Texas Instruments; Manufacturer Part Number: LMS8117AMP-3.3/NOPB; Number of Outputs: 1; Min Input Voltage: 2.5V; Max Input Voltage: 15V; Polarity: Positive; Quiescent Current: 10mA; Accuracy: 1%; Output Type: Fixed; Dropout Voltage: 1.2V; Nominal Supply Current: 5mA; Supplier 1: Arrow Electronics; RoHS: Yes; Category: Voltage Regulators - Linear; Stock 1: 843; Pricing 1: 1=1.18760, 10=1.01800, 100=0.77540, 250=0.68460, 500=0.64870, 1000=0.59270 (USD); Mount: Surface Mount; Case/Package: SOT-223; Number of Pins: 4; Contact Plating: Tin,Matte; Min Operating Temperature: 0°C; Max Operating Temperature: 125°C; Output Voltage: 3.3V; Max Output Current: 1A; Packaging: Tape and Reel; Output Current: 1A; Nominal Output Voltage: 3.3V; Output Voltage Accuracy: 1%; Current Rating: 1A; Package Quantity: 1000; Length: 6.5mm; Width: 3.56mm; Height: 1.6mm; Radiation Hardening: No; REACH SVHC: No SVHC; Lead Free: Lead Free; RoHS Compliant: Yes; Supplier Part Number 1: LMS8117AMP-3.3/NOPB; LCSC Part Number: C201952; Item Type: IC; ComponentLink11Description: LCSC; ComponentLink11URL: https://www.lcsc.com/product-detail/Linear-Voltage-Regulators-LDO_Texas-Instruments-LMS8117AMP-3-3-NOPB_C201952.html
footprint SOT- 223
pins: 1 ADJUST or GND, 2 OUTPUT, 3 INPUT, 4 OUTPUT

## LMUN2211LT1G
designator Q?
NPN 246mW 100mA 50V SOT-23 Digital Transistors ROHS; Manufacturer: LRC; Manufacturer Part Number: LMUN2211LT1G; Item Type: Mosfet; Package: SOT-23; LCSC Part Number: C12775; ComponentLink1Description: LCSC; ComponentLink1URL: https://www.lcsc.com/product-detail/Digital-Transistors_LRC-LMUN2211LT1G_C12775.html
footprint SOT-23 (TRANS NPN 40V 0.6A SOT23)
pins: 1 B, 2 E, 3 C

## LMV321AIDBVR
designator U?
10pA 1 1MHz SOT-23-5 Operational Amplifier ROHS; Manufacturer: Texas Instruments; Manufacturer Part Number: LMV321AIDBVR; Item Type: IC; Package: SOT-23-5; LCSC Part Number: C484730; ComponentLink1Description: LCSC; ComponentLink1URL: https://www.lcsc.com/product-detail/Operational-Amplifier_Texas-Instruments-LMV321AIDBVR_C484730.html
footprint SOT-23-5
pins: 1 OUT, 2 -V (power), 3 IN+, 4 -IN, 5 +V (power)

## LMV331SE/7
designator U?
IC COMPARATOR TINY LV SOT353; Manufacturer: Diodes; Manufacturer Part Number: LMV331SE-7; Voltage Gain: 93.98dB; Min Supply Voltage: 2.7V; Max Supply Voltage: 5.5V; Number of Elements: 1; Input Offset Voltage (Vos): 7mV; Input Bias Current: 250nA; Output Current: 84mA; Quiescent Current: 120uA; Propagation Delay: 450ns; Supplier 1: Digi-Key; RoHS: Yes; Category: Comparators; Stock 1: 56688; Pricing 1: 1=0.50000, 10=0.37500, 25=0.33800, 100=0.23360, 250=0.19672, 500=0.15984, 1000=0.12296 (USD); Mount: Surface Mount; Case/Package: SOT-353; Min Operating Temperature: -40°C; Max Operating Temperature: 125°C; Packaging: Tape and Reel; Max Input Current: 250nA; Type: General Purpose; Lead Free: Lead Free; RoHS Compliant: Yes; ComponentLink1URL: http://www.mouser.com/ds/2/115/LMV331_393-335820.pdf?src-supplier=Mouser; ComponentLink1Description: http://www.mouser.com/ds/2/115/LMV331_393-335820.pdf?src-supplier=Mouser; ComponentLink2URL: http://diodes.com/datasheets/LMV331_393.pdf?src-supplier=Avnet; ComponentLink2Description: http://diodes.com/datasheets/LMV331_393.pdf?src-supplier=Avnet; ComponentLink3URL: https://www.diodes.com/assets/Datasheets/LMV331_393.pdf?src-supplier=Digi-Key; ComponentLink3Description: https://www.diodes.com/assets/Datasheets/LMV331_393.pdf?src-supplier=Digi-Key; Supplier Part Number 1: LMV331SE-7DICT-ND; LCSC Part Number: C151353; Item Type: IC
footprint SOT-353_
pins: 1 VIN+, 2 VEE (power), 3 VIN-, 4 VOUT, 5 VCC (power)

## LP3320B6F
designator U?
SOT-23-6 AC-DC Controllers & Regulators ROHS; Manufacturer: LOWPOWER; Manufacturer Part Number: LP3320B6F; Item Type: IC; Package: SOT-23-6; LCSC Part Number: C387699; ComponentLink1Description: LCSC; ComponentLink1URL: https://www.lcsc.com/product-detail/AC-DC-Controllers-Regulators_LOWPOWER-LP3320B6F_C387699.html
footprint SOT-23-6
pins: 1 LX, 2 GND, 3 FB, 4 EN, 5 NC, 6 VIN

## LP5900SD-3.3/NOPB
designator U?
IC REG LINEAR 3.3V 150MA 6WSON; Manufacturer: Texas Instruments; Manufacturer Part Number: LP5900SD-3.3/NOPB; Package: WSON-6-EP(2x2); LCSC Part Number: C131975; Item Type: IC; ComponentLink1Description: LCSC; ComponentLink1URL: https://www.lcsc.com/product-detail/Linear-Voltage-Regulators-LDO_Texas-Instruments-LP5900SD-3-3-NOPB_C131975.html
footprint 6-WSON (2.2x2.5)
pins: 1 OUT, 2 N/C, 3 GND, 4 EN, 5 N/C, 6 IN, 7 GND

## LPW5209B5F-21
designator U?
2.1Amp SOT-23-5 Power Distribution Switches ROHS; Manufacturer: LOWPOWER; Manufacturer Part Number: LPW5209B5F-21; Supplier 1: LCSC; RoHS: No; Stock 1: 3390; Pricing 1: 5=0.14760, 50=0.12140, 150=0.10820, 500=0.09840, 2500=0.09050, 5000=0.08660 (USD); Supplier Part Number 1: C517266; ComponentLink1Description: LCSC; ComponentLink1URL: https://www.lcsc.com/product-detail/Power-Distribution-Switches_LOWPOWER-LPW5209B5F-21_C517266.html
footprint SOT-23-5
pins: 1 VOUT, 2 GND, 3 NC, 4 EN, 5 VIN

## LPW5213B6F
designator U?
SOT-23-6 Power Distribution Switches ROHS; Manufacturer: LOWPOWER; Manufacturer Part Number: LPW5213B6F; Package: SOT-23-6; ComponentLink1Description: LCSC; ComponentLink1URL: https://www.lcsc.com/product-detail/Power-Distribution-Switches_LOWPOWER-LPW5213B6F_C517134.html; LCSC Part Number: C517134
footprint SOT-23-6
pins: 1 EN, 2 GND, 3 VIN, 4 OUT, 5 GND, 6 NC

## LQH3NPN2R2MJRL
designator L?, comment 2.2uH
FIXED IND 2.2UH 980MA 81.6 MOHM; Manufacturer: Murata; Manufacturer Part Number: LQH3NPN2R2MJRL; Core Material: Ferrite; Saturation Current: 1.8A; Shielding: Shielded; DC Resistance (DCR): 81.6mR; Self Resonant Frequency: 45MHz; Test Frequency: 1MHz; Tolerance: 20%; Item Type: Inductor; Supplier 1: Arrow Electronics; RoHS: Yes; Category: Fixed Inductors; Stock 1: 1497; Pricing 1: 1=0.41670, 10=0.27560, 25=0.27280, 100=0.23380, 250=0.22710, 500=0.21570, 1000=0.17630 (USD); Mounting Technology: Surface Mount; Case/Package: 1212; Case Code (Metric): 3030; Case Code (Imperial): 1212; Min Operating Temperature: -40°C; Max Operating Temperature: 105°C; Packaging: Tape and Reel; Resistor Type: Wirewound; Value: 2.2uH; Current Rating: 980mA; Length: 0.118inch; Width: 0.118inch; Height - Seated (Max): 0.047inch; RoHS Compliant: Yes; ComponentLink1URL: http://www.murata.com/~/media/webrenewal/support/library/catalog/products/inductor/chip/o05e.ashx?src-supplier=Digi-Key; ComponentLink1Description: http://www.murata.com/~/media/webrenewal/support/library/catalog/products/inductor/chip/o05e.ashx?src-supplier=Digi-Key; ComponentLink2URL: http://search.murata.co.jp/Ceramy/image/img/P02/JELF243A-0114.pdf?src-supplier=Digi-Key; ComponentLink2Description: http://search.murata.co.jp/Ceramy/image/img/P02/JELF243A-0114.pdf?src-supplier=Digi-Key; Supplier Part Number 1: LQH3NPN2R2MJRL; LCSC Part Number: C341775
footprint LQH3NPN2R2MJRL
pins: 1, 2

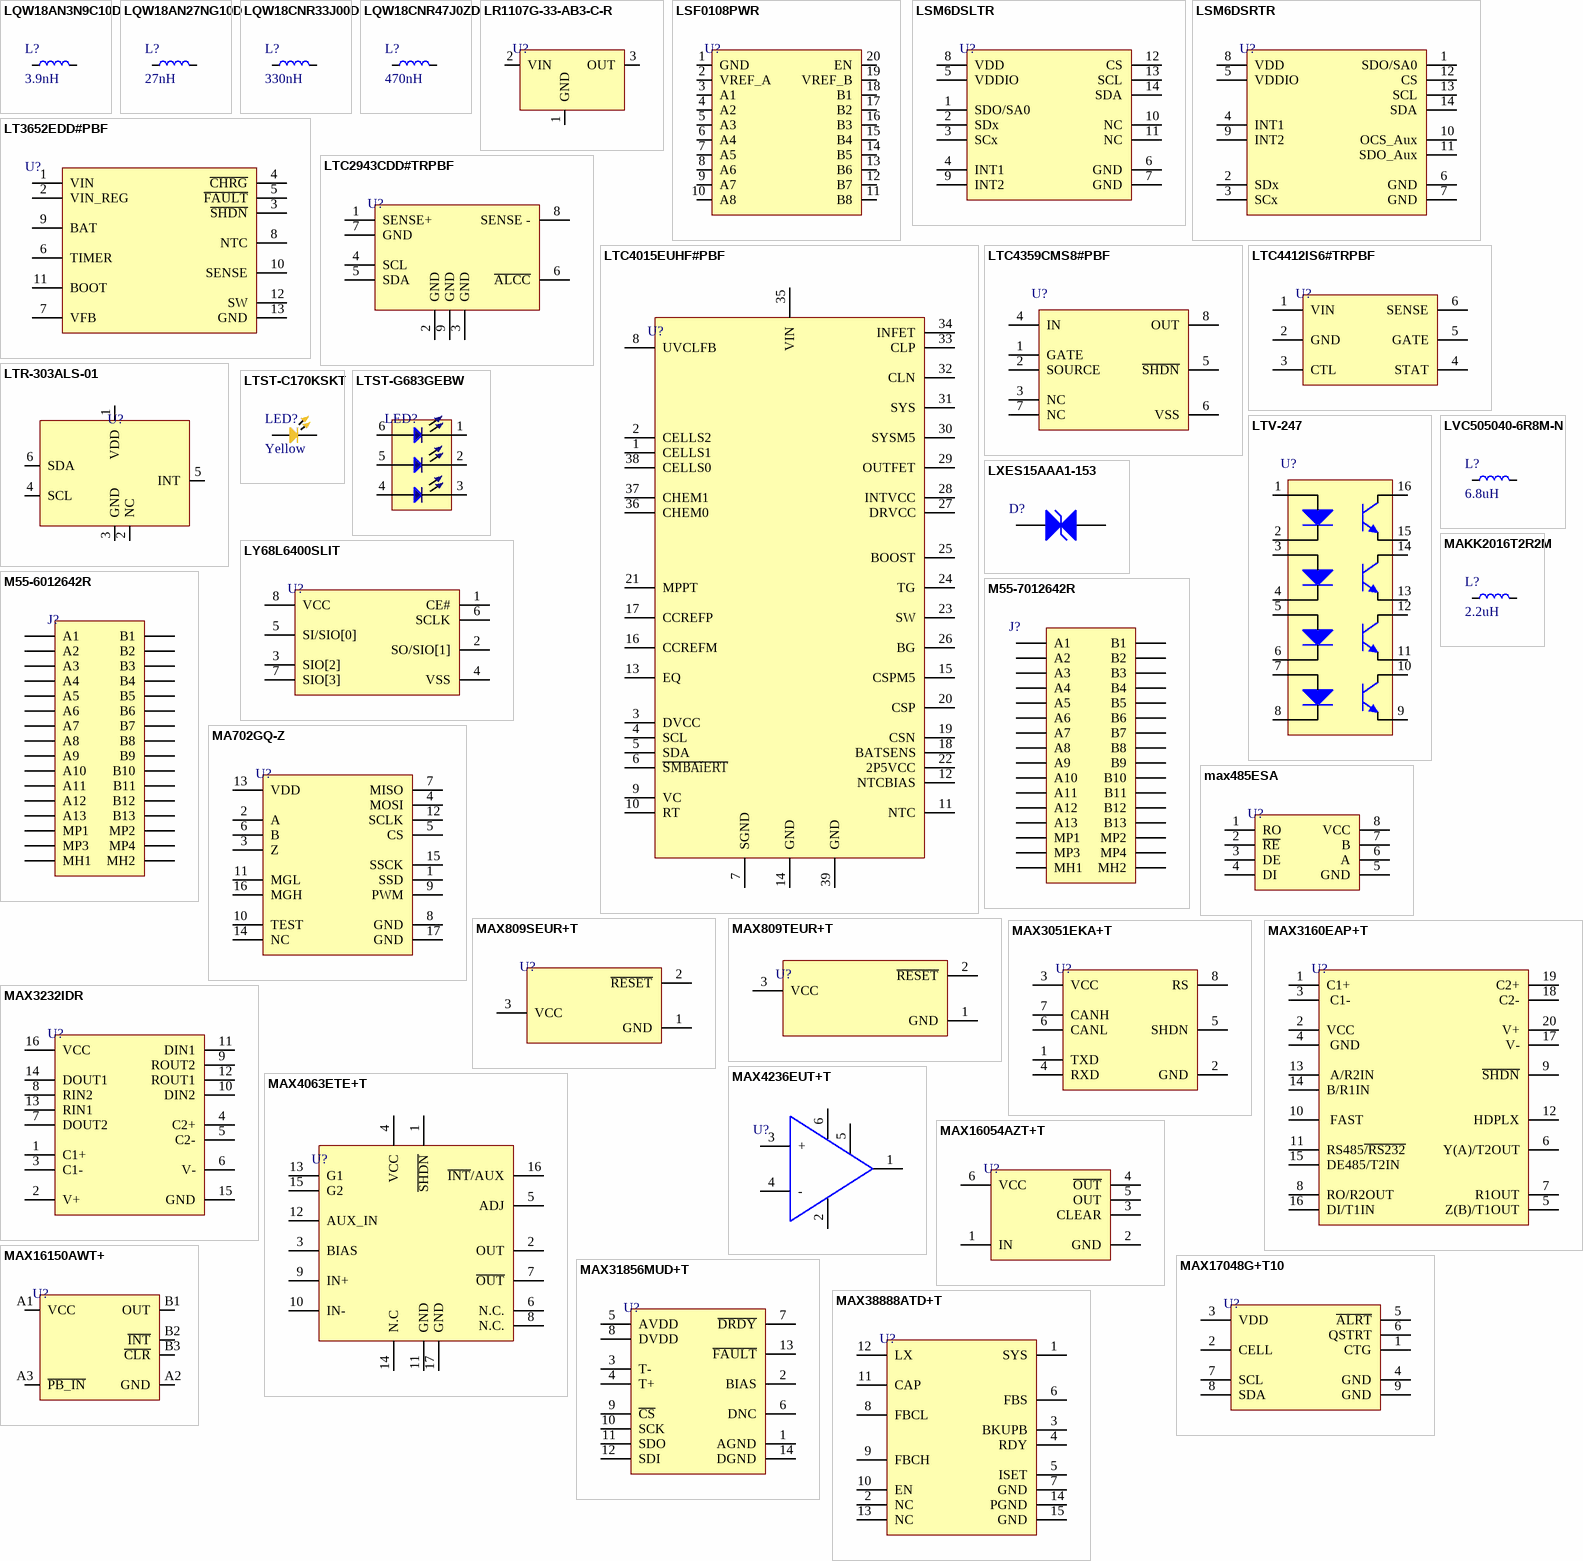
[diagram p14: symbols LQW18AN3N9C10D to MAX38888ATD+T]